# Altium footprint library PBL - SMD Packages.PcbLib: 144 footprints (part 7 of 9)
Each footprint in its own frame and in the unit in brackets; x right, y up, seen from the top. Pads: shape width x height; smd on the part's side, far side on the other; paste and mask are expansions set on the pad; w line width, h text height; cw(c..) or ccw(c..) is an arc to the next point about the centre after c.
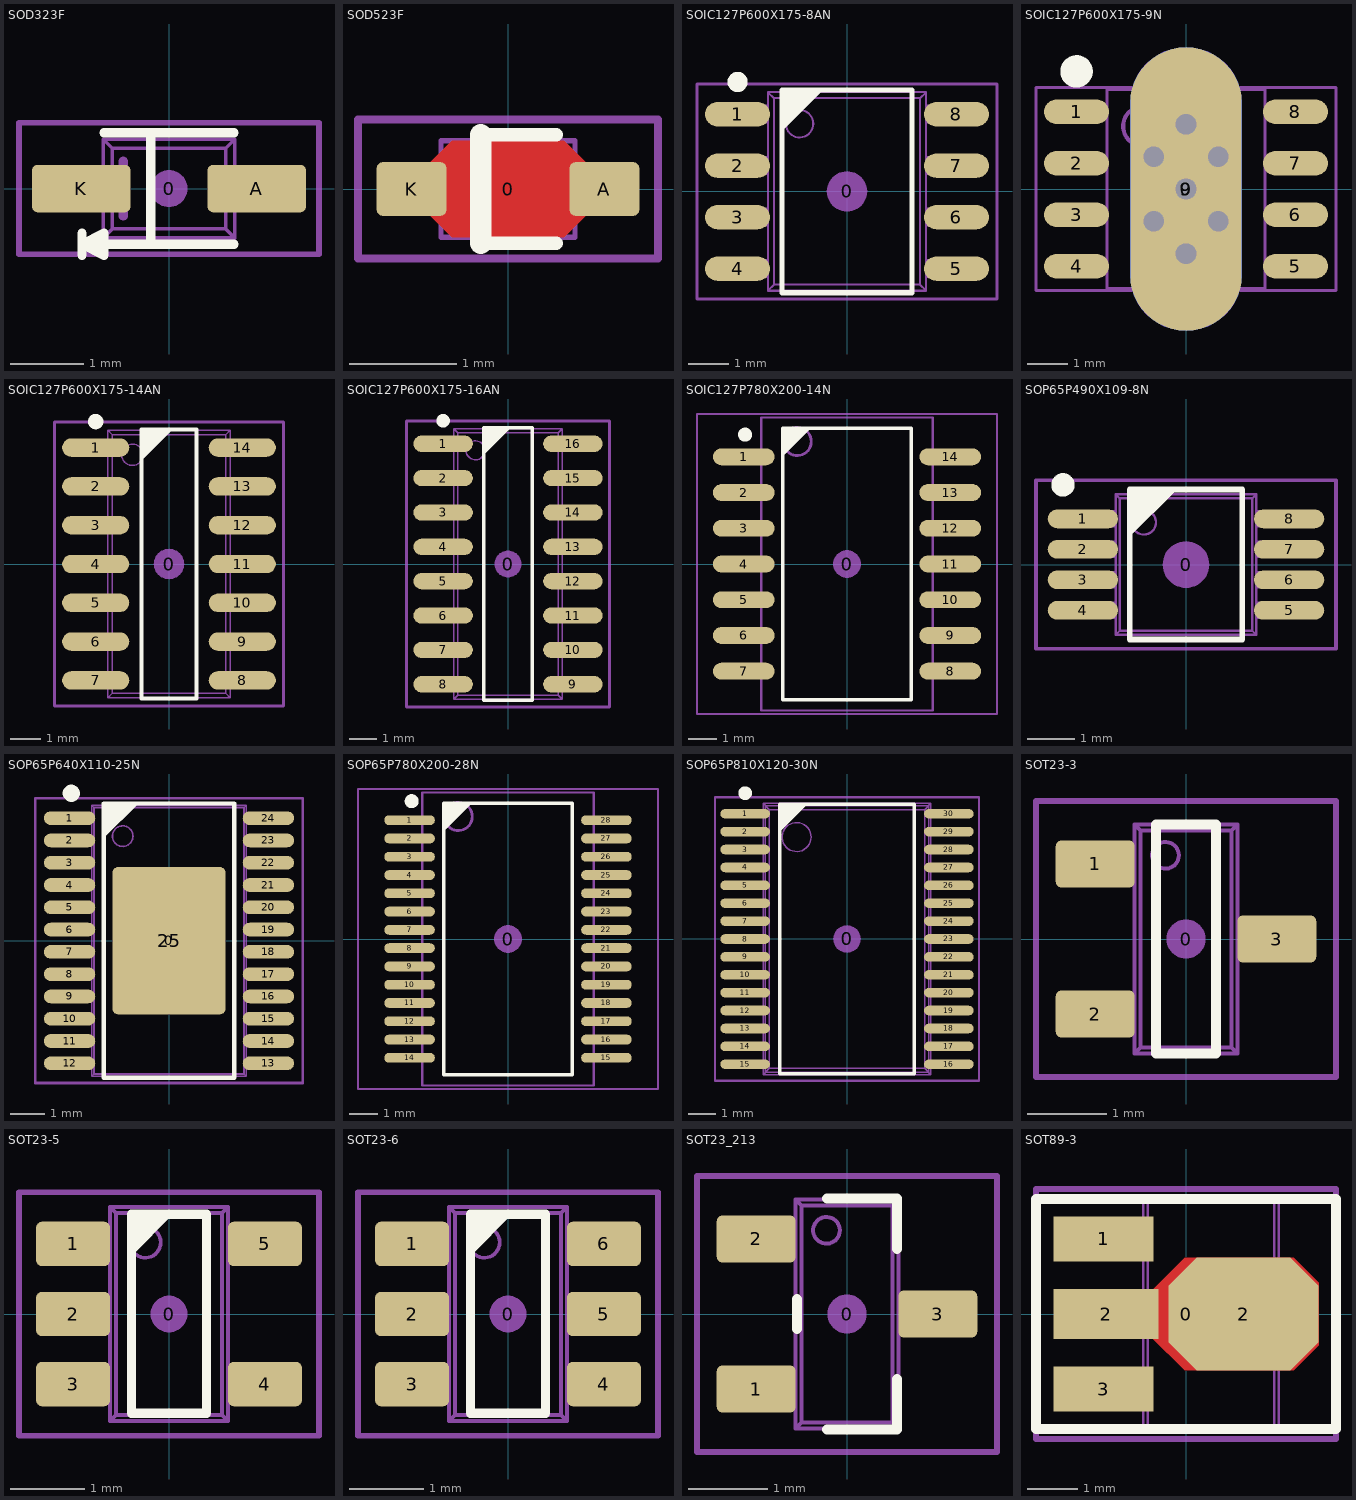
[diagram p6: the footprints below, top view; thin cyan lines are the x and y axes]

## SOD323F [mm] "SOD-323; 2 Leads; Body 2.7 x 1.6 mm, (LxW)"
height 1.35
pads (3):
  round 0.508 on Mech15: 0(0,0)
  rrect25% 1.35x0.65 smd: A(1.2,0) K(-1.2,0)
Top Overlay:
  lines w0.127: -1.189,-0.912 -1.189,-0.612 ; -0.889,0.762 0.889,0.762 ; -0.25,-0.762 -0.25,0.762 ; 0.889,-0.762 -0.889,-0.762 -1.189,-0.762 ; -1.189,-0.762 -0.889,-0.612 -0.889,-0.912 -1.189,-0.762
13 - 3D Top Side:
  lines w0.05: -0.9,-0.2 -1.25,-0.2 -1.25,0.2 -0.9,0.2 ; 0.9,-0.2 1.25,-0.2 1.25,0.2 0.9,0.2 ; -0.9,-0.675 0.9,-0.675 ; -0.9,-0.675 -0.9,0.675 ; -0.9,-0.675 -0.776,-0.551 ; -0.9,0.675 0.9,0.675 ; -0.9,0.675 -0.776,0.551 ; -0.776,-0.551 0.776,-0.551 ; -0.776,-0.551 -0.776,0.551 ; -0.776,0.551 0.776,0.551 ; 0.776,-0.551 0.9,-0.675 ; 0.776,-0.551 0.776,0.551 ; 0.776,0.551 0.9,0.675 ; 0.9,-0.675 0.9,0.675
  lines w0.127: -0.625,-0.375 -0.625,0.375
15 - Top Courtyards:
  lines w0.076: -2.05,-0.9 -2.05,0.9 2.05,0.9 2.05,-0.9 -2.05,-0.9
3D body: height 1, standoff 0, extent -1.25,-0.675 1.25,0.675

## SOD523F [mm] "SOD-523F; 2 Leads; Body 1.3 x 0.9 mm, (LxW)"
height 0.7
pads (3):
  round 0.508 on Mech15: 0(0,0)
  rrect20% 0.65x0.5 smd: A(0.9,0) K(-0.9,0)
Top Layer:
  pour cut-out: -0.725,-0.25 -0.725,0.25 -0.525,0.45 0.525,0.45 0.725,0.25 0.725,-0.25 0.525,-0.45 -0.525,-0.45
Top Overlay:
  lines w0.127: -0.254,-0.508 0.45,-0.508 ; -0.254,0.508 0.45,0.508
  lines w0.2: -0.254,-0.508 -0.254,0.508
  text "." at -0.9,-0.625 h0.05
13 - 3D Top Side:
  lines w0.05: -0.625,-0.175 -0.625,0.175 ; -0.625,-0.175 -0.625,-0.45 0.625,-0.45 0.625,-0.175 ; -0.625,-0.175 -0.85,-0.175 -0.85,0.175 -0.625,0.175 ; -0.625,0.175 -0.625,0.45 0.625,0.45 0.625,0.175 ; 0.625,-0.175 0.625,0.175 ; 0.625,-0.175 0.85,-0.175 0.85,0.175 0.625,0.175
  lines w0.127: -0.425,-0.275 -0.425,0.275
15 - Top Courtyards:
  lines w0.076: -1.4,-0.65 1.4,-0.65 1.4,0.65 -1.4,0.65 -1.4,-0.65
3D body: height 0.7, standoff 0, extent -0.85,-0.45 0.85,0.45

## SOIC127P600X175-8AN [mm] "SOIC, 8-Leads, Body 4.9x3.9mm, Pitch 1.27mm, IPC Medium Density"
height 1.75
pads (9):
  round 1 on Mech15: 0(0,0)
  oval 1.6x0.6 smd: 1(-2.7,1.905) 2(-2.7,0.635) 3(-2.7,-0.635) 4(-2.7,-1.905) 5(2.7,-1.905) 6(2.7,-0.635) 7(2.7,0.635) 8(2.7,1.905)
Top Overlay:
  circle w0.25: c-2.7,2.7 r0.125
  region: -1.6,2.5 -0.6,2.5 -1.6,1.5
  lines w0.127: -1.6,-2.5 -1.6,2.5 1.6,2.5 1.6,-2.5 -1.6,-2.5
13 - 3D Top Side:
  circle w0.05: c-1.17,1.67 r0.338
  lines w0.05: -2.631,-2.115 -2.631,-1.695 ; -2.631,-0.845 -2.631,-0.425 ; -2.631,0.425 -2.631,0.845 ; -2.631,1.695 -2.631,2.115 ; -2.543,-2.115 -2.543,-1.695 ; -2.543,-0.845 -2.543,-0.425 ; -2.543,0.425 -2.543,0.845 ; -2.543,1.695 -2.543,2.115 ; -2.403,-2.115 -2.403,-1.695 ; -2.403,-0.845 -2.403,-0.425 ; -2.403,0.425 -2.403,0.845 ; -2.403,1.695 -2.403,2.115 ; -2.113,-2.115 -2.113,-1.695 ; -2.113,-0.845 -2.113,-0.425 ; -2.113,0.425 -2.113,0.845 ; -2.113,1.695 -2.113,2.115 ; -1.95,-2.115 -3,-2.115 -3,-1.695 -1.95,-1.695 ; -1.95,-0.845 -3,-0.845 -3,-0.425 -1.95,-0.425 ; -1.95,0.425 -3,0.425 -3,0.845 -1.95,0.845 ; -1.95,1.695 -3,1.695 -3,2.115 -1.95,2.115 ; 1.95,-2.115 3,-2.115 3,-1.695 1.95,-1.695 ; 1.95,-0.845 3,-0.845 3,-0.425 1.95,-0.425 ; 1.95,0.425 3,0.425 3,0.845 1.95,0.845 ; 1.95,1.695 3,1.695 3,2.115 1.95,2.115 ; 2.113,-2.115 2.113,-1.695 ; 2.113,-0.845 2.113,-0.425 ; 2.113,0.425 2.113,0.845 ; 2.113,1.695 2.113,2.115 ; 2.403,-2.115 2.403,-1.695 ; 2.403,-0.845 2.403,-0.425 ; 2.403,0.425 2.403,0.845 ; 2.403,1.695 2.403,2.115 ; 2.543,-2.115 2.543,-1.695 ; 2.543,-0.845 2.543,-0.425 ; 2.543,0.425 2.543,0.845 ; 2.543,1.695 2.543,2.115 ; 2.631,-2.115 2.631,-1.695 ; 2.631,-0.845 2.631,-0.425 ; 2.631,0.425 2.631,0.845 ; 2.631,1.695 2.631,2.115 ; -1.95,-2.45 1.95,-2.45 ; -1.95,-2.45 -1.95,2.45 ; -1.95,-2.45 -1.801,-2.301 ; -1.95,2.45 -1.801,2.301 ; -1.95,2.45 1.95,2.45 ; -1.801,-2.301 1.801,-2.301 ; -1.801,-2.301 -1.801,2.301 ; -1.801,2.301 1.801,2.301 ; 1.801,-2.301 1.95,-2.45 ; 1.801,-2.301 1.801,2.301 ; 1.801,2.301 1.95,2.45 ; 1.95,-2.45 1.95,2.45
15 - Top Courtyards:
  lines w0.076: -3.7,-2.65 -3.7,2.65 3.7,2.65 3.7,-2.65 -3.7,-2.65
3D body: height 1.75, standoff 0, extent -3,-2.45 3,2.45

## SOIC127P600X175-9N [mm] "SOIC, 8-Leads with thermal tab, Body 4.9x3.9mm, Pitch 1.27mm, IPC Medium Density"
height 1.75
pads (11):
  round 1 on Mech15: 0(0,0)
  oval 1.6x0.6 smd: 1(-2.7,1.905) 2(-2.7,0.635) 3(-2.7,-0.635) 4(-2.7,-1.905) 5(2.7,-1.905) 6(2.7,-0.635) 7(2.7,0.635) 8(2.7,1.905)
  oval 2.75x7 smd paste-2: 9(0,0)
  oval 2.75x7 smd far side paste-2: 9(0,0)
via 0,0 diameter 1.016 hole 0.508
via -0.8,0.8 diameter 1.016 hole 0.508
via 0.8,0.8 diameter 1.016 hole 0.508
via 0.8,-0.8 diameter 1.016 hole 0.508
via -0.8,-0.8 diameter 1.016 hole 0.508
via 0,1.6 diameter 1.016 hole 0.508
via 0,-1.6 diameter 1.016 hole 0.508
Top Overlay:
  circle w0.4: c-2.7,2.9 r0.2
13 - 3D Top Side:
  circle w0.1: c-1.05,1.55 r0.5
  lines w0.076: -1.95,-2.45 1.95,-2.45 1.95,2.45 -1.95,2.45 -1.95,-2.45
15 - Top Courtyards:
  lines w0.076: -3.7,-2.5 3.7,-2.5 3.7,2.5 -3.7,2.5 -3.7,-2.5
3D body: height 1.75, standoff 0, extent -3,-2.45 3,2.45

## SOIC127P600X175-14AN [mm] "SOIC, 1.27mm pitch, 14 pin, Body 8.65x3.90mm"
height 1.75
pads (15):
  round 1 on Mech15: 0(0,0)
  oval 2.2x0.6 smd: 1(-2.4,3.81) 2(-2.4,2.54) 3(-2.4,1.27) 4(-2.4,0) 5(-2.4,-1.27) 6(-2.4,-2.54) 7(-2.4,-3.81) 8(2.4,-3.81) 9(2.4,-2.54) 10(2.4,-1.27) 11(2.4,0) 12(2.4,1.27) 13(2.4,2.54) 14(2.4,3.81)
Top Overlay:
  circle w0.25: c-2.4,4.66 r0.125
  region: -0.9,4.4 0.1,4.4 -0.9,3.4
  lines w0.127: -0.9,-4.4 -0.9,4.4 0.9,4.4 0.9,-4.4 -0.9,-4.4
13 - 3D Top Side:
  circle w0.05: c-1.2,3.575 r0.35
  lines w0.05: -2.631,-4.02 -2.631,-3.6 ; -2.631,-2.75 -2.631,-2.33 ; -2.631,-1.48 -2.631,-1.06 ; -2.631,-0.21 -2.631,0.21 ; -2.631,1.06 -2.631,1.48 ; -2.631,2.33 -2.631,2.75 ; -2.631,3.6 -2.631,4.02 ; -2.543,-4.02 -2.543,-3.6 ; -2.543,-2.75 -2.543,-2.33 ; -2.543,-1.48 -2.543,-1.06 ; -2.543,-0.21 -2.543,0.21 ; -2.543,1.06 -2.543,1.48 ; -2.543,2.33 -2.543,2.75 ; -2.543,3.6 -2.543,4.02 ; -2.403,-4.02 -2.403,-3.6 ; -2.403,-2.75 -2.403,-2.33 ; -2.403,-1.48 -2.403,-1.06 ; -2.403,-0.21 -2.403,0.21 ; -2.403,1.06 -2.403,1.48 ; -2.403,2.33 -2.403,2.75 ; -2.403,3.6 -2.403,4.02 ; -2.113,-4.02 -2.113,-3.6 ; -2.113,-2.75 -2.113,-2.33 ; -2.113,-1.48 -2.113,-1.06 ; -2.113,-0.21 -2.113,0.21 ; -2.113,1.06 -2.113,1.48 ; -2.113,2.33 -2.113,2.75 ; -2.113,3.6 -2.113,4.02 ; -2,-4.02 -3,-4.02 -3,-3.6 -2,-3.6 ; -2,-2.75 -3,-2.75 -3,-2.33 -2,-2.33 ; -2,-1.48 -3,-1.48 -3,-1.06 -2,-1.06 ; -2,-0.21 -3,-0.21 -3,0.21 -2,0.21 ; -2,1.06 -3,1.06 -3,1.48 -2,1.48 ; -2,2.33 -3,2.33 -3,2.75 -2,2.75 ; -2,3.6 -3,3.6 -3,4.02 -2,4.02 ; 2,-4.02 3,-4.02 3,-3.6 2,-3.6 ; 2,-2.75 3,-2.75 3,-2.33 2,-2.33 ; 2,-1.48 3,-1.48 3,-1.06 2,-1.06 ; 2,-0.21 3,-0.21 3,0.21 2,0.21 ; 2,1.06 3,1.06 3,1.48 2,1.48 ; 2,2.33 3,2.33 3,2.75 2,2.75 ; 2,3.6 3,3.6 3,4.02 2,4.02 ; 2.113,-4.02 2.113,-3.6 ; 2.113,-2.75 2.113,-2.33 ; 2.113,-1.48 2.113,-1.06 ; 2.113,-0.21 2.113,0.21 ; 2.113,1.06 2.113,1.48 ; 2.113,2.33 2.113,2.75 ; 2.113,3.6 2.113,4.02 ; 2.403,-4.02 2.403,-3.6 ; 2.403,-2.75 2.403,-2.33 ; 2.403,-1.48 2.403,-1.06 ; 2.403,-0.21 2.403,0.21 ; 2.403,1.06 2.403,1.48 ; 2.403,2.33 2.403,2.75 ; 2.403,3.6 2.403,4.02 ; 2.543,-4.02 2.543,-3.6 ; 2.543,-2.75 2.543,-2.33 ; 2.543,-1.48 2.543,-1.06 ; 2.543,-0.21 2.543,0.21 ; 2.543,1.06 2.543,1.48 ; 2.543,2.33 2.543,2.75 ; 2.543,3.6 2.543,4.02 ; 2.631,-4.02 2.631,-3.6 ; 2.631,-2.75 2.631,-2.33 ; 2.631,-1.48 2.631,-1.06 ; 2.631,-0.21 2.631,0.21 ; 2.631,1.06 2.631,1.48 ; 2.631,2.33 2.631,2.75 ; 2.631,3.6 2.631,4.02 ; -2,-4.375 2,-4.375 ; -2,-4.375 -1.851,-4.226 ; -2,-4.375 -2,4.375 ; -2,4.375 2,4.375 ; -2,4.375 -1.851,4.226 ; -1.851,-4.226 -1.851,4.226 ; -1.851,-4.226 1.851,-4.226 ; -1.851,4.226 1.851,4.226 ; 1.851,-4.226 1.851,4.226 ; 1.851,-4.226 2,-4.375 ; 1.851,4.226 2,4.375 ; 2,-4.375 2,4.375
15 - Top Courtyards:
  lines w0.1: -3.75,-4.65 -3.75,4.65 3.75,4.65 3.75,-4.65 -3.75,-4.65
3D body: height 1.75, standoff 0, extent -3.006,-4.325 3.006,4.325

## SOIC127P600X175-16AN [mm] "SOIC, 1.27mm pitch, 16 pin, Body 9.9x3.90mm"
height 1.75
pads (17):
  round 1 on Mech15: 0(0,0)
  oval 2.2x0.6 smd: 1(-2.4,4.445) 2(-2.4,3.175) 3(-2.4,1.905) 4(-2.4,0.635) 5(-2.4,-0.635) 6(-2.4,-1.905) 7(-2.4,-3.175) 8(-2.4,-4.445) 9(2.4,-4.445) 10(2.4,-3.175) 11(2.4,-1.905) 12(2.4,-0.635) 13(2.4,0.635) 14(2.4,1.905) 15(2.4,3.175) 16(2.4,4.445)
Top Overlay:
  circle w0.25: c-2.4,5.295 r0.125
  region: -0.9,5.035 0.1,5.035 -0.9,4.035
  lines w0.127: -0.9,-5.035 -0.9,5.035 0.9,5.035 0.9,-5.035 -0.9,-5.035
13 - 3D Top Side:
  circle w0.05: c-1.2,4.2 r0.35
  lines w0.05: -2.631,-4.655 -2.631,-4.235 ; -2.631,-3.385 -2.631,-2.965 ; -2.631,-2.115 -2.631,-1.695 ; -2.631,-0.845 -2.631,-0.425 ; -2.631,0.425 -2.631,0.845 ; -2.631,1.695 -2.631,2.115 ; -2.631,2.965 -2.631,3.385 ; -2.631,4.235 -2.631,4.655 ; -2.543,-4.655 -2.543,-4.235 ; -2.543,-3.385 -2.543,-2.965 ; -2.543,-2.115 -2.543,-1.695 ; -2.543,-0.845 -2.543,-0.425 ; -2.543,0.425 -2.543,0.845 ; -2.543,1.695 -2.543,2.115 ; -2.543,2.965 -2.543,3.385 ; -2.543,4.235 -2.543,4.655 ; -2.403,-4.655 -2.403,-4.235 ; -2.403,-3.385 -2.403,-2.965 ; -2.403,-2.115 -2.403,-1.695 ; -2.403,-0.845 -2.403,-0.425 ; -2.403,0.425 -2.403,0.845 ; -2.403,1.695 -2.403,2.115 ; -2.403,2.965 -2.403,3.385 ; -2.403,4.235 -2.403,4.655 ; -2.113,-4.655 -2.113,-4.235 ; -2.113,-3.385 -2.113,-2.965 ; -2.113,-2.115 -2.113,-1.695 ; -2.113,-0.845 -2.113,-0.425 ; -2.113,0.425 -2.113,0.845 ; -2.113,1.695 -2.113,2.115 ; -2.113,2.965 -2.113,3.385 ; -2.113,4.235 -2.113,4.655 ; -2,-4.655 -3,-4.655 -3,-4.235 -2,-4.235 ; -2,-3.385 -3,-3.385 -3,-2.965 -2,-2.965 ; -2,-2.115 -3,-2.115 -3,-1.695 -2,-1.695 ; -2,-0.845 -3,-0.845 -3,-0.425 -2,-0.425 ; -2,0.425 -3,0.425 -3,0.845 -2,0.845 ; -2,1.695 -3,1.695 -3,2.115 -2,2.115 ; -2,2.965 -3,2.965 -3,3.385 -2,3.385 ; -2,4.235 -3,4.235 -3,4.655 -2,4.655 ; 2,-4.655 3,-4.655 3,-4.235 2,-4.235 ; 2,-3.385 3,-3.385 3,-2.965 2,-2.965 ; 2,-2.115 3,-2.115 3,-1.695 2,-1.695 ; 2,-0.845 3,-0.845 3,-0.425 2,-0.425 ; 2,0.425 3,0.425 3,0.845 2,0.845 ; 2,1.695 3,1.695 3,2.115 2,2.115 ; 2,2.965 3,2.965 3,3.385 2,3.385 ; 2,4.235 3,4.235 3,4.655 2,4.655 ; 2.113,-4.655 2.113,-4.235 ; 2.113,-3.385 2.113,-2.965 ; 2.113,-2.115 2.113,-1.695 ; 2.113,-0.845 2.113,-0.425 ; 2.113,0.425 2.113,0.845 ; 2.113,1.695 2.113,2.115 ; 2.113,2.965 2.113,3.385 ; 2.113,4.235 2.113,4.655 ; 2.403,-4.655 2.403,-4.235 ; 2.403,-3.385 2.403,-2.965 ; 2.403,-2.115 2.403,-1.695 ; 2.403,-0.845 2.403,-0.425 ; 2.403,0.425 2.403,0.845 ; 2.403,1.695 2.403,2.115 ; 2.403,2.965 2.403,3.385 ; 2.403,4.235 2.403,4.655 ; 2.543,-4.655 2.543,-4.235 ; 2.543,-3.385 2.543,-2.965 ; 2.543,-2.115 2.543,-1.695 ; 2.543,-0.845 2.543,-0.425 ; 2.543,0.425 2.543,0.845 ; 2.543,1.695 2.543,2.115 ; 2.543,2.965 2.543,3.385 ; 2.543,4.235 2.543,4.655 ; 2.631,-4.655 2.631,-4.235 ; 2.631,-3.385 2.631,-2.965 ; 2.631,-2.115 2.631,-1.695 ; 2.631,-0.845 2.631,-0.425 ; 2.631,0.425 2.631,0.845 ; 2.631,1.695 2.631,2.115 ; 2.631,2.965 2.631,3.385 ; 2.631,4.235 2.631,4.655 ; -2,-5 -2,5 ; -2,-5 -1.851,-4.851 ; -2,-5 2,-5 ; -2,5 -1.851,4.851 ; -2,5 2,5 ; -1.851,-4.851 1.851,-4.851 ; -1.851,-4.851 -1.851,4.851 ; -1.851,4.851 1.851,4.851 ; 1.851,-4.851 2,-5 ; 1.851,-4.851 1.851,4.851 ; 1.851,4.851 2,5 ; 2,-5 2,5
15 - Top Courtyards:
  lines w0.1: -3.75,-5.285 -3.75,5.285 3.75,5.285 3.75,-5.285 -3.75,-5.285
3D body: height 1.75, standoff 0, extent -3,-5 3,5

## SOIC127P780X200-14N [mm] "SOIC, 14 Leads, Body 10.5x5.3mm, Pitch 1.27mm, IPC Medium Density"
height 2
pads (15):
  round 1 on Mech15: 0(0,0)
  oval 2.2x0.6 smd: 1(-3.67,3.81) 2(-3.67,2.54) 3(-3.67,1.27) 4(-3.67,0) 5(-3.67,-1.27) 6(-3.67,-2.54) 7(-3.67,-3.81) 8(3.67,-3.81) 9(3.67,-2.54) 10(3.67,-1.27) 11(3.67,0) 12(3.67,1.27) 13(3.67,2.54) 14(3.67,3.81)
Top Overlay:
  circle w0.25: c-3.625,4.6 r0.125
  region: -2.286,4.826 -1.286,4.826 -2.286,3.826
  lines w0.127: -2.286,-4.826 -2.286,4.826 2.286,4.826 2.286,-4.826 -2.286,-4.826
13 - 3D Top Side:
  circle w0.1: c-1.77,4.355 r0.5
  lines w0.076: -3.048,-5.207 -3.048,5.207 3.048,5.207 3.048,-5.207 -3.048,-5.207
15 - Top Courtyards:
  lines w0.076: -5.334,-5.334 -5.334,5.334 5.334,5.334 5.334,-5.334 -5.334,-5.334
3D body: height 2, standoff 0, extent -3.904,-5.25 3.904,5.25

## SOP65P490X109-8N [mm] "SOP, 0.65mm pitch, 8 pin, Body 3.0x3.0x1.09mm LWH, IPC Medium Density"
height 1.09
pads (9):
  round 1 on Mech15: 0(0,0)
  oval 1.5x0.4 smd: 1(-2.2,0.975) 2(-2.2,0.325) 3(-2.2,-0.325) 4(-2.2,-0.975) 5(2.2,-0.975) 6(2.2,-0.325) 7(2.2,0.325) 8(2.2,0.975)
Top Overlay:
  circle w0.25: c-2.625,1.7 r0.125
  region: -1.2,1.6 -0.2,1.6 -1.2,0.6
  lines w0.127: -1.2,-1.6 1.2,-1.6 1.2,1.6 -1.2,1.6 -1.2,-1.6
13 - 3D Top Side:
  circle w0.05: c-0.9,0.9 r0.26
  lines w0.05: -2.162,-1.135 -2.162,-0.815 ; -2.162,-0.485 -2.162,-0.165 ; -2.162,0.165 -2.162,0.485 ; -2.162,0.815 -2.162,1.135 ; -2.074,-1.135 -2.074,-0.815 ; -2.074,-0.485 -2.074,-0.165 ; -2.074,0.165 -2.074,0.485 ; -2.074,0.815 -2.074,1.135 ; -2.019,-1.135 -2.019,-0.815 ; -2.019,-0.485 -2.019,-0.165 ; -2.019,0.165 -2.019,0.485 ; -2.019,0.815 -2.019,1.135 ; -1.749,-1.135 -1.749,-0.815 ; -1.749,-0.485 -1.749,-0.165 ; -1.749,0.165 -1.749,0.485 ; -1.749,0.815 -1.749,1.135 ; -1.5,-1.135 -2.45,-1.135 -2.45,-0.815 -1.5,-0.815 ; -1.5,-0.485 -2.45,-0.485 -2.45,-0.165 -1.5,-0.165 ; -1.5,0.165 -2.45,0.165 -2.45,0.485 -1.5,0.485 ; -1.5,0.815 -2.45,0.815 -2.45,1.135 -1.5,1.135 ; 1.5,-1.135 2.45,-1.135 2.45,-0.815 1.5,-0.815 ; 1.5,-0.485 2.45,-0.485 2.45,-0.165 1.5,-0.165 ; 1.5,0.165 2.45,0.165 2.45,0.485 1.5,0.485 ; 1.5,0.815 2.45,0.815 2.45,1.135 1.5,1.135 ; 1.749,-1.135 1.749,-0.815 ; 1.749,-0.485 1.749,-0.165 ; 1.749,0.165 1.749,0.485 ; 1.749,0.815 1.749,1.135 ; 2.019,-1.135 2.019,-0.815 ; 2.019,-0.485 2.019,-0.165 ; 2.019,0.165 2.019,0.485 ; 2.019,0.815 2.019,1.135 ; 2.074,-1.135 2.074,-0.815 ; 2.074,-0.485 2.074,-0.165 ; 2.074,0.165 2.074,0.485 ; 2.074,0.815 2.074,1.135 ; 2.162,-1.135 2.162,-0.815 ; 2.162,-0.485 2.162,-0.165 ; 2.162,0.165 2.162,0.485 ; 2.162,0.815 2.162,1.135 ; -1.5,-1.5 -1.413,-1.413 ; -1.5,-1.5 -1.5,1.5 ; -1.5,-1.5 1.5,-1.5 ; -1.5,1.5 1.5,1.5 ; -1.5,1.5 -1.413,1.413 ; -1.413,-1.413 -1.413,1.413 ; -1.413,-1.413 1.413,-1.413 ; -1.413,1.413 1.413,1.413 ; 1.413,-1.413 1.413,1.413 ; 1.413,-1.413 1.5,-1.5 ; 1.413,1.413 1.5,1.5 ; 1.5,-1.5 1.5,1.5
15 - Top Courtyards:
  lines w0.076: -3.2,-1.8 3.2,-1.8 3.2,1.8 -3.2,1.8 -3.2,-1.8
3D body: height 1.1, standoff 0, extent -2.45,-1.5 2.45,1.5

## SOP65P640X110-25N [mm] "TSSOP, 24-Leads, Body 7.9x4.5mm (max), Pitch 0.65mm, IPC Medium Density; JEDEC MO-153"
height 1.1
pads (26):
  round 0.508 on Mech15 mask+0.127: 0(0,0)
  oval 1.5x0.4 smd mask+0.127: 1(-2.9,3.575) 2(-2.9,2.925) 3(-2.9,2.275) 4(-2.9,1.625) 5(-2.9,0.975) 6(-2.9,0.325) 7(-2.9,-0.325) 8(-2.9,-0.975) 9(-2.9,-1.625) 10(-2.9,-2.275) 11(-2.9,-2.925) 12(-2.9,-3.575) 13(2.9,-3.575) 14(2.9,-2.925) 15(2.9,-2.275) 16(2.9,-1.625) 17(2.9,-0.975) 18(2.9,-0.325) 19(2.9,0.325) 20(2.9,0.975) 21(2.9,1.625) 22(2.9,2.275) 23(2.9,2.925) 24(2.9,3.575)
  rrect10% 3.3x4.3 smd paste-0.7: 25(0,0)
Top Overlay:
  circle w0.25: c-2.85,4.3 r0.125
  region: -1.9,4 -0.9,4 -1.9,3
  lines w0.127: -1.9,-4 1.9,-4 1.9,4 -1.9,4 -1.9,-4
13 - 3D Top Side:
  drawing of 181 lines, arcs and shapes, not listed
15 - Top Courtyards:
  lines w0.076: -3.9,-4.15 3.9,-4.15 3.9,4.15 -3.9,4.15 -3.9,-4.15
3D body: height 1.2, standoff 0, extent -3.25,-3.95 3.25,3.95

## SOP65P780X200-28N [mm] "SOP, 28 Leads, Body 10.2x5.3mm, Pitch 0.65mm, IPC Medium Density"
height 2
pads (29):
  round 1 on Mech15: 0(0,0)
  oval 1.8x0.35 smd: 1(-3.5,4.225) 2(-3.5,3.575) 3(-3.5,2.925) 4(-3.5,2.275) 5(-3.5,1.625) 6(-3.5,0.975) 7(-3.5,0.325) 8(-3.5,-0.325) 9(-3.5,-0.975) 10(-3.5,-1.625) 11(-3.5,-2.275) 12(-3.5,-2.925) 13(-3.5,-3.575) 14(-3.5,-4.225) 15(3.5,-4.225) 16(3.5,-3.575) 17(3.5,-2.925) 18(3.5,-2.275) 19(3.5,-1.625) 20(3.5,-0.975) 21(3.5,-0.325) 22(3.5,0.325) 23(3.5,0.975) 24(3.5,1.625) 25(3.5,2.275) 26(3.5,2.925) 27(3.5,3.575) 28(3.5,4.225)
Top Overlay:
  circle w0.25: c-3.425,4.9 r0.125
  region: -2.286,4.826 -1.286,4.826 -2.286,3.826
  lines w0.127: -2.286,-4.826 2.286,-4.826 2.286,4.826 -2.286,4.826 -2.286,-4.826
13 - 3D Top Side:
  circle w0.1: c-1.77,4.355 r0.5
  lines w0.076: -3.048,-5.207 3.048,-5.207 3.048,5.207 -3.048,5.207 -3.048,-5.207
15 - Top Courtyards:
  lines w0.076: -5.334,-5.334 5.334,-5.334 5.334,5.334 -5.334,5.334 -5.334,-5.334
3D body: height 1.88, standoff 0, extent -3.903,-5.1 3.903,5.1

## SOP65P810X120-30N [mm] "SOP, 30-Leads, Body 9.8x6.2mm (max), Pitch 0.65mm, IPC Medium Density"
height 1.2
pads (31):
  round 1 on Mech15: 0(0,0)
  oval 1.8x0.35 smd mask+0.152: 1(-3.7,4.55) 2(-3.7,3.9) 3(-3.7,3.25) 4(-3.7,2.6) 5(-3.7,1.95) 6(-3.7,1.3) 7(-3.7,0.65) 8(-3.7,0) 9(-3.7,-0.65) 10(-3.7,-1.3) 11(-3.7,-1.95) 12(-3.7,-2.6) 13(-3.7,-3.25) 14(-3.7,-3.9) 15(-3.7,-4.55) 16(3.7,-4.55) 17(3.7,-3.9) 18(3.7,-3.25) 19(3.7,-2.6) 20(3.7,-1.95) 21(3.7,-1.3) 22(3.7,-0.65) 23(3.7,0) 24(3.7,0.65) 25(3.7,1.3) 26(3.7,1.95) 27(3.7,2.6) 28(3.7,3.25) 29(3.7,3.9) 30(3.7,4.55)
Top Overlay:
  circle w0.25: c-3.7,5.3 r0.125
  region: -2.45,4.9 -1.45,4.9 -2.45,3.9
  lines w0.127: -2.45,-4.9 -2.45,4.9 2.45,4.9 2.45,-4.9 -2.45,-4.9
13 - 3D Top Side:
  drawing of 227 lines, arcs and shapes, not listed
15 - Top Courtyards:
  lines w0.076: -4.8,-5.15 -4.8,5.15 4.8,5.15 4.8,-5.15 -4.8,-5.15
3D body: height 1.3, standoff 0, extent -4.05,-4.925 4.05,4.925

## SOT23-3 [mm] "SOT23, 3 pin"
height 1.003
pads (4):
  round 0.5 on Mech15: 0(0,0)
  rrect25% 1x0.6 smd: 1(-1.15,0.95) 2(-1.15,-0.95) 3(1.15,0)
Top Overlay:
  lines w0.127: -0.381,-1.45 -0.381,1.45 0.381,1.45 0.381,-1.45 -0.381,-1.45
  text "." at -2.125,0.95 h0.1
13 - 3D Top Side:
  circle w0.05: c-0.26,1.06 r0.169
  lines w0.05: -1.19,-1.19 -1.19,-0.71 ; -1.19,0.71 -1.19,1.19 ; -1.099,-1.19 -1.099,-0.71 ; -1.099,0.71 -1.099,1.19 ; -1.074,-1.19 -1.074,-0.71 ; -1.074,0.71 -1.074,1.19 ; -0.825,-1.19 -0.825,-0.71 ; -0.825,0.71 -0.825,1.19 ; -0.65,-1.19 -1.4,-1.19 -1.4,-0.71 -0.65,-0.71 ; -0.65,0.71 -1.4,0.71 -1.4,1.19 -0.65,1.19 ; 0.65,-0.24 1.4,-0.24 1.4,0.24 0.65,0.24 ; 0.825,-0.24 0.825,0.24 ; 1.074,-0.24 1.074,0.24 ; 1.099,-0.24 1.099,0.24 ; 1.19,-0.24 1.19,0.24 ; -0.65,-1.45 0.65,-1.45 ; -0.65,-1.45 -0.65,1.45 ; -0.65,-1.45 -0.576,-1.376 ; -0.65,1.45 -0.576,1.376 ; -0.65,1.45 0.65,1.45 ; -0.576,-1.376 0.576,-1.376 ; -0.576,-1.376 -0.576,1.376 ; -0.576,1.376 0.576,1.376 ; 0.576,-1.376 0.65,-1.45 ; 0.576,-1.376 0.576,1.376 ; 0.576,1.376 0.65,1.45 ; 0.65,-1.45 0.65,1.45
15 - Top Courtyards:
  lines w0.076: -1.9,-1.75 -1.9,1.75 1.9,1.75 1.9,-1.75 -1.9,-1.75
3D body: height 1.29, standoff -0.01, extent -1.4,-1.45 1.4,1.45

## SOT23-5 [mm]
height 1.6
pads (6):
  round 0.5 on Mech15: 0(0,0)
  rrect25% 1x0.6 smd: 1(-1.3,0.95) 2(-1.3,0) 3(-1.3,-0.95) 4(1.3,-0.95) 5(1.3,0.95)
Top Overlay:
  region: -0.508,1.353 0.053,1.353 -0.508,0.792
  lines w0.127: -0.508,-1.347 -0.508,1.353 0.508,1.353 0.508,-1.347 -0.508,-1.347
  text "." at -2.275,0.95 h0.1
13 - 3D Top Side:
  circle w0.05: c-0.32,0.97 r0.208
  lines w0.05: -1.191,-1.15 -1.191,-0.75 ; -1.191,-0.2 -1.191,0.2 ; -1.191,0.75 -1.191,1.15 ; -1.1,-1.15 -1.1,-0.75 ; -1.1,-0.2 -1.1,0.2 ; -1.1,0.75 -1.1,1.15 ; -1.094,-1.15 -1.094,-0.75 ; -1.094,-0.2 -1.094,0.2 ; -1.094,0.75 -1.094,1.15 ; -0.844,-1.15 -0.844,-0.75 ; -0.844,-0.2 -0.844,0.2 ; -0.844,0.75 -0.844,1.15 ; -0.8,-1.15 -1.4,-1.15 -1.4,-0.75 -0.8,-0.75 ; -0.8,-0.2 -1.4,-0.2 -1.4,0.2 -0.8,0.2 ; -0.8,0.75 -1.4,0.75 -1.4,1.15 -0.8,1.15 ; 0.8,-1.15 1.4,-1.15 1.4,-0.75 0.8,-0.75 ; 0.8,0.75 1.4,0.75 1.4,1.15 0.8,1.15 ; 0.844,-1.15 0.844,-0.75 ; 0.844,0.75 0.844,1.15 ; 1.094,-1.15 1.094,-0.75 ; 1.094,0.75 1.094,1.15 ; 1.1,-1.15 1.1,-0.75 ; 1.1,0.75 1.1,1.15 ; 1.191,-1.15 1.191,-0.75 ; 1.191,0.75 1.191,1.15 ; -0.8,-1.45 -0.8,1.45 ; -0.8,-1.45 -0.719,-1.369 ; -0.8,-1.45 0.8,-1.45 ; -0.8,1.45 -0.719,1.369 ; -0.8,1.45 0.8,1.45 ; -0.719,-1.369 0.719,-1.369 ; -0.719,-1.369 -0.719,1.369 ; -0.719,1.369 0.719,1.369 ; 0.719,-1.369 0.8,-1.45 ; 0.719,-1.369 0.719,1.369 ; 0.719,1.369 0.8,1.45 ; 0.8,-1.45 0.8,1.45
15 - Top Courtyards:
  lines w0.076: -2.032,-1.651 -2.032,1.651 2.032,1.651 2.032,-1.651 -2.032,-1.651
3D body: height 1.44, standoff -0.01, extent -1.4,-1.45 1.4,1.45

## SOT23-6 [mm]
height 1.6
pads (7):
  round 0.5 on Mech15: 0(0,0)
  rrect25% 1x0.6 smd: 1(-1.3,0.95) 2(-1.3,0) 3(-1.3,-0.95) 4(1.3,-0.95) 5(1.3,0) 6(1.3,0.95)
Top Overlay:
  region: -0.508,1.353 0.053,1.353 -0.508,0.792
  lines w0.127: -0.508,-1.347 -0.508,1.353 0.508,1.353 0.508,-1.347 -0.508,-1.347
  text "." at -2.275,0.95 h0.1
13 - 3D Top Side:
  circle w0.05: c-0.32,0.97 r0.208
  lines w0.05: -1.191,-1.15 -1.191,-0.75 ; -1.191,-0.2 -1.191,0.2 ; -1.191,0.75 -1.191,1.15 ; -1.1,-1.15 -1.1,-0.75 ; -1.1,-0.2 -1.1,0.2 ; -1.1,0.75 -1.1,1.15 ; -1.094,-1.15 -1.094,-0.75 ; -1.094,-0.2 -1.094,0.2 ; -1.094,0.75 -1.094,1.15 ; -0.844,-1.15 -0.844,-0.75 ; -0.844,-0.2 -0.844,0.2 ; -0.844,0.75 -0.844,1.15 ; -0.8,-1.15 -1.4,-1.15 -1.4,-0.75 -0.8,-0.75 ; -0.8,-0.2 -1.4,-0.2 -1.4,0.2 -0.8,0.2 ; -0.8,0.75 -1.4,0.75 -1.4,1.15 -0.8,1.15 ; 0.8,-1.15 1.4,-1.15 1.4,-0.75 0.8,-0.75 ; 0.8,-0.2 1.4,-0.2 1.4,0.2 0.8,0.2 ; 0.8,0.75 1.4,0.75 1.4,1.15 0.8,1.15 ; 0.844,-1.15 0.844,-0.75 ; 0.844,-0.2 0.844,0.2 ; 0.844,0.75 0.844,1.15 ; 1.094,-1.15 1.094,-0.75 ; 1.094,-0.2 1.094,0.2 ; 1.094,0.75 1.094,1.15 ; 1.1,-1.15 1.1,-0.75 ; 1.1,-0.2 1.1,0.2 ; 1.1,0.75 1.1,1.15 ; 1.191,-1.15 1.191,-0.75 ; 1.191,-0.2 1.191,0.2 ; 1.191,0.75 1.191,1.15 ; -0.8,-1.45 0.8,-1.45 ; -0.8,-1.45 -0.719,-1.369 ; -0.8,-1.45 -0.8,1.45 ; -0.8,1.45 0.8,1.45 ; -0.8,1.45 -0.719,1.369 ; -0.719,-1.369 -0.719,1.369 ; -0.719,-1.369 0.719,-1.369 ; -0.719,1.369 0.719,1.369 ; 0.719,-1.369 0.719,1.369 ; 0.719,-1.369 0.8,-1.45 ; 0.719,1.369 0.8,1.45 ; 0.8,-1.45 0.8,1.45
15 - Top Courtyards:
  lines w0.076: -2.032,-1.651 -2.032,1.651 2.032,1.651 2.032,-1.651 -2.032,-1.651
3D body: height 1.44, standoff -0.01, extent -1.4,-1.45 1.4,1.45

## SOT23_213 [mm]
height 1.003
pads (4):
  round 0.5 on Mech15: 0(0,0)
  rrect25% 1x0.6 smd: 1(-1.15,-0.95) 2(-1.15,0.95) 3(1.15,0)
Top Overlay:
  lines w0.127: -0.635,-0.191 -0.635,0.191 ; -0.254,-1.46 0.635,-1.46 0.635,-0.826 ; -0.254,1.46 0.635,1.46 0.635,0.826
13 - 3D Top Side:
  circle w0.05: c-0.26,1.06 r0.169
  lines w0.05: -1.19,-1.19 -1.19,-0.71 ; -1.19,0.71 -1.19,1.19 ; -1.099,-1.19 -1.099,-0.71 ; -1.099,0.71 -1.099,1.19 ; -1.074,-1.19 -1.074,-0.71 ; -1.074,0.71 -1.074,1.19 ; -0.825,-1.19 -0.825,-0.71 ; -0.825,0.71 -0.825,1.19 ; -0.65,-1.19 -1.4,-1.19 -1.4,-0.71 -0.65,-0.71 ; -0.65,0.71 -1.4,0.71 -1.4,1.19 -0.65,1.19 ; 0.65,-0.24 1.4,-0.24 1.4,0.24 0.65,0.24 ; 0.825,-0.24 0.825,0.24 ; 1.074,-0.24 1.074,0.24 ; 1.099,-0.24 1.099,0.24 ; 1.19,-0.24 1.19,0.24 ; -0.65,-1.45 -0.576,-1.376 ; -0.65,-1.45 -0.65,1.45 ; -0.65,-1.45 0.65,-1.45 ; -0.65,1.45 0.65,1.45 ; -0.65,1.45 -0.576,1.376 ; -0.576,-1.376 -0.576,1.376 ; -0.576,-1.376 0.576,-1.376 ; -0.576,1.376 0.576,1.376 ; 0.576,-1.376 0.576,1.376 ; 0.576,-1.376 0.65,-1.45 ; 0.576,1.376 0.65,1.45 ; 0.65,-1.45 0.65,1.45
15 - Top Courtyards:
  lines w0.076: -1.9,-1.75 -1.9,1.75 1.9,1.75 1.9,-1.75 -1.9,-1.75
3D body: height 1.29, standoff -0.01, extent -1.4,-1.45 1.4,1.45

## SOT89-3 [mm] "JEDEC TO-243 option AA / SOT89"
height 1.7
pads (5):
  round 1 on Mech15: 0(0,0)
  rrect1% 2x0.9 smd: 1(-1.65,1.5) 3(-1.65,-1.5)
  rrect1% 2.1x1 smd: 2(-1.6,0)
  oct 3x2.25 smd: 2(1.15,0)
Top Layer:
  region: -0.7,-0.45 -0.025,-1.125 2.15,-1.125 2.65,-0.625 2.65,0.625 2.15,1.125 -0.025,1.125 -0.7,0.45
Top Overlay:
  lines w0.2: -3,-2.3 -3,2.3 3,2.3 3,-2.3 -3,-2.3
13 - 3D Top Side:
  lines w0.05: -0.85,-1.76 -0.85,-2.35 ; -0.85,-1.24 -0.85,-0.3 ; -0.85,0.3 -0.85,1.24 ; -0.85,1.76 -0.85,2.35 ; 1.85,-0.925 1.85,-2.35 ; 1.85,0.925 1.85,2.35 ; -0.85,-2.35 1.85,-2.35 ; -0.85,-2.35 -0.761,-2.261 ; -0.85,2.35 1.85,2.35 ; -0.85,2.35 -0.761,2.261 ; -0.761,-2.261 1.761,-2.261 ; -0.761,-2.261 -0.761,2.261 ; -0.761,2.261 1.761,2.261 ; 1.761,-2.261 1.761,2.261 ; 1.761,-2.261 1.85,-2.35 ; 1.761,2.261 1.85,2.35 ; -2.25,-1.76 -2.25,-1.24 -0.824,-1.24 -0.824,-1.76 -2.25,-1.76 ; -2.25,-0.3 -0.824,-0.3 -0.824,0.3 -2.25,0.3 -2.25,-0.3 ; -2.25,1.24 -2.25,1.76 -0.824,1.76 -0.824,1.24 -2.25,1.24 ; 1.824,-0.925 1.9,-0.925 2.2,-0.625 2.2,0.625 1.9,0.925 1.824,0.925 1.824,-0.925
15 - Top Courtyards:
  lines w0.127: -3,-2.5 -3,2.5 3,2.5 3,-2.5 -3,-2.5
3D body: height 1.69, standoff 0, extent -2.25,-2.35 2.2,2.35